# Altium schematic symbol library Tester_componete_PCB.SchLib: 34 symbols
Pins are listed as number, name and electrical type; pins without a type are passive.

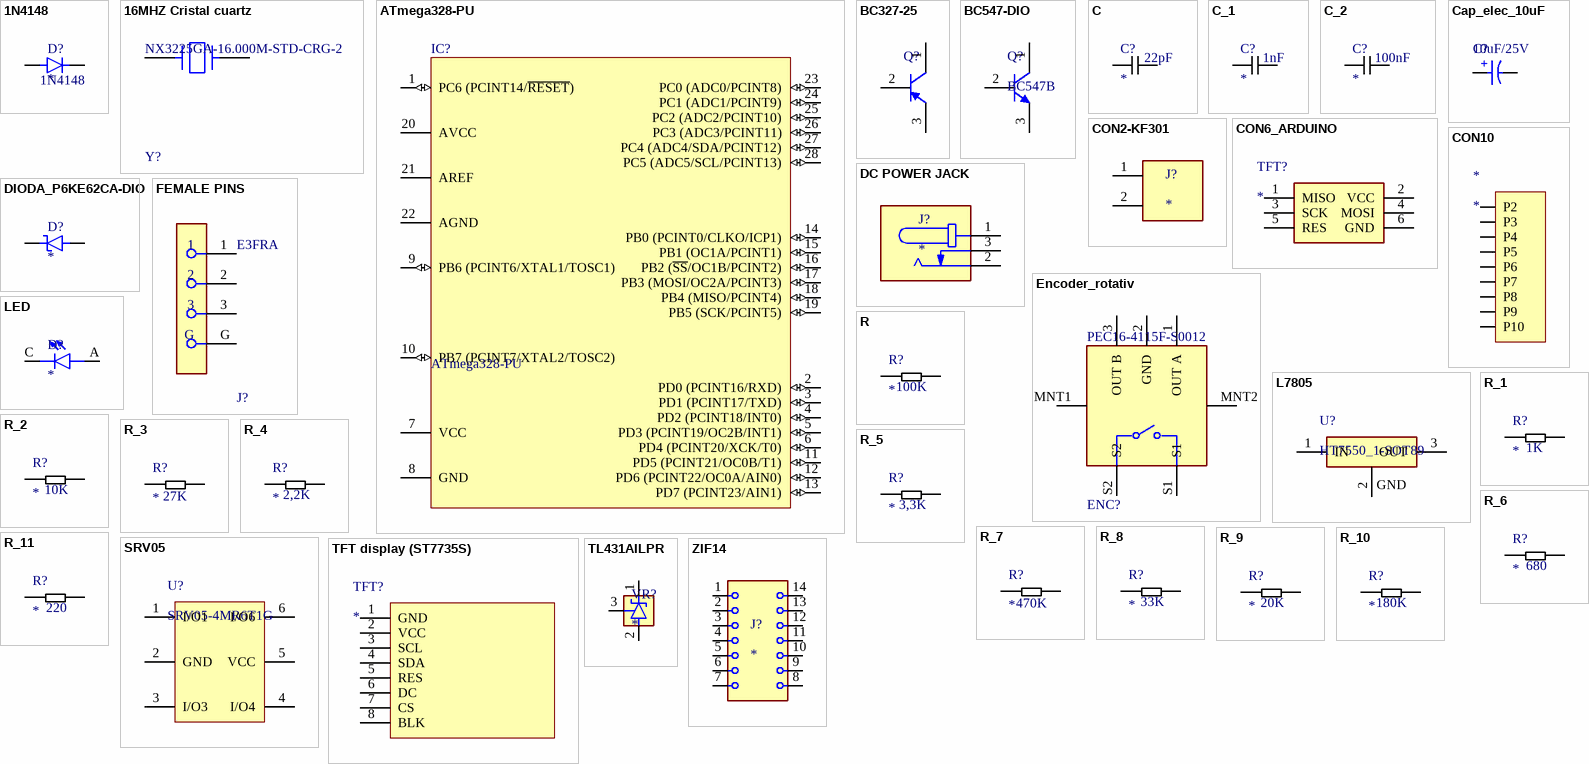
[diagram p0: symbols 1N4148 to ZIF14]

## 1N4148
designator D?  value 1N4148
Diode Standard 100 V 200mA Through Hole DO-35; MF: ON Semiconductor; MP: 1N4148TA; SnapEDA_Link: https://www.snapeda.com/parts/1N4148TA/Onsemi/view-part/?ref=snap; Package: AXIAL LEAD-2 ON Semiconductor; Check_prices: https://www.snapeda.com/parts/1N4148TA/Onsemi/view-part/?ref=eda
footprint FP_1N4148_DO35
pins: A, K

## 16MHZ Cristal cuartz
designator Y?, comment NX3225GA-16.000M-STD-CRG-2
CRYSTAL 16.0000MHZ 8PF SMD; Frequency Stability: 30ppm; Frequency Tolerance: 20ppm; Frequency: 16MHz; ESR (Equivalent Series Resistance): 80R; Min Operating Temperature: -40°C; Mount: Surface Mount; Width: 0.098inch; Case/Package: SMD/SMT; Max Operating Temperature: 85°C; Number of Pins: 4; Length: 0.126inch; Load Capacitance: 8pF; Packaging: Tape and Reel; Package Quantity: 3000; Height: 0.035inch
footprint Cristal_16.00MHz (Cristal;16MHz;THT;20pF;±30ppm;±5ppm/an;1mW;4,88mm / Producator: YIC; Simbol producator: 16.00M-HC49-S; Conformitate / RoHS)
pins: 1, 2

## ATmega328-PU
designator IC?
8-bit AVR Microcontroller, 32KB Flash, 1KB EEPROM, 2KB SRAM, 28-pin PDIP, Industrial Grade (-40°C to 85°C); ComponentLink3Description: ATmega48A/48PA/88A/88PA/168A/168PA/328/328P Summary; RevisionNote: DatasheetVersion updated. URLs added.; DatasheetVersion: revD, May-2011; ComponentLink1URL: http://www.atmel.com/; PackageVersion: revB, Sep-2001; PackageDescription: 28-lead (0.300"/7.62mm Wide) Plastic Dual Inline Package (PDIP); PackageReference: 28P3; ComponentLink1Description: Manufacturer URL; ComponentLink2Description: ATmega48A/48PA/88A/88PA/168A/168PA/328/328P Datasheet; ComponentLink3URL: http://www.atmel.com/dyn/resources/prod_documents/8271S.pdf; ComponentLink2URL: http://www.atmel.com/dyn/resources/prod_documents/8271.pdf
footprint FP_ATMEGA328_DIP28P3 (28-Pin Plastic Dual In-Line Package (PDIP))
pins: 1 PC6 (PCINT14/~{RESET}) (io), 2 PD0 (PCINT16/RXD) (io), 3 PD1 (PCINT17/TXD) (io), 4 PD2 (PCINT18/INT0) (io), 5 PD3 (PCINT19/OC2B/INT1) (io), 6 PD4 (PCINT20/XCK/T0) (io), 7 VCC (power), 8 GND (power), 9 PB6 (PCINT6/XTAL1/TOSC1) (io), 10 PB7 (PCINT7/XTAL2/TOSC2) (io), 11 PD5 (PCINT21/OC0B/T1) (io), 12 PD6 (PCINT22/OC0A/AIN0) (io), 13 PD7 (PCINT23/AIN1) (io), 14 PB0 (PCINT0/CLKO/ICP1) (io), 15 PB1 (OC1A/PCINT1) (io), 16 PB2 (~{SS}/OC1B/PCINT2) (io), 17 PB3 (MOSI/OC2A/PCINT3) (io), 18 PB4 (MISO/PCINT4) (io), 19 PB5 (SCK/PCINT5) (io), 20 AVCC (power), 21 AREF (power), 22 AGND (power), 23 PC0 (ADC0/PCINT8) (io), 24 PC1 (ADC1/PCINT9) (io), 25 PC2 (ADC2/PCINT10) (io), 26 PC3 (ADC3/PCINT11) (io), 27 PC4 (ADC4/SDA/PCINT12) (io), 28 PC5 (ADC5/SCL/PCINT13) (io)

## BC327-25
designator Q?
Tranzistor:PNP;bipolar;45V;0,8A;625mW;TO92 / Producator: DIOTEC SEMICONDUCTOR; Simbol producator: / BC327-25; Conformitate RoHS; Manufacturer: TT Electronics; DC Current Gain (hFE) (Min) @ Ic, Vce: 75@1mA,10V; Vce Saturation (Max) @ Ib, Ic: 1V@50mA,500mA; Current - Collector Cutoff (Max): 50nA; Transistor Type: NPN; Current - Collector (Ic) (Max): 800mA; PCN Design/Specification: TransistorDieChange20/Jun/2014; Voltage - Collector Emitter Breakdown (Max): 50V; Power - Max: 500mW; Online Catalog: NPNTransistors; Other Names: 2N2222AUA-ND365-1563; Mounting Type: SurfaceMount; Package Description: 4-Pin Leadless Chip Carrier, Body 5.59 x 3.81 mm, Pitch 1.27 mm; Manufacturer URL: http://www.ttelectronics.com/; Datasheet Version: 08/2012; Package / Case: 4-CLCC; Package Reference: MO-041BA; Series: -; Category: DiscreteSemiconductorProducts; Supplier Device Package: CeramicSMD; Packaging: Bulk; Mounting Technology: SurfaceMount; Family: Transistors(BJT)-Single; Datasheet URL: http://www.ttelectronics.com/themes/ttelectronics/datasheets/semiconductors/transistors/2N2222AUA.pdf; Frequency - Transition: -; Standard Package: 1
footprint FP_BC327-25_TO-92_CBE
pins: 1 C, 2 B, 3 E

## BC547-DIO
designator Q?, comment BC547B
Tranzistor:NPN;bipolar;45V;0,1A;500mW;TO92 / Producator: DIOTEC SEMICONDUCTOR; Simbol producator: / BC547B; Conformitate RoHS; Manufacturer: TT Electronics; DC Current Gain (hFE) (Min) @ Ic, Vce: 75@1mA,10V; Vce Saturation (Max) @ Ib, Ic: 1V@50mA,500mA; Current - Collector Cutoff (Max): 50nA; Transistor Type: NPN; Current - Collector (Ic) (Max): 800mA; PCN Design/Specification: TransistorDieChange20/Jun/2014; Voltage - Collector Emitter Breakdown (Max): 50V; Online Catalog: NPNTransistors; Other Names: 2N2222AUA-ND365-1563; Mounting Type: SurfaceMount; Package Description: 4-Pin Leadless Chip Carrier, Body 5.59 x 3.81 mm, Pitch 1.27 mm; Manufacturer URL: http://www.ttelectronics.com/; Datasheet Version: 08/2012; Package / Case: 4-CLCC; Package Reference: MO-041BA; Series: -; Category: DiscreteSemiconductorProducts; Supplier Device Package: CeramicSMD; Packaging: Bulk; Mounting Technology: SurfaceMount; Family: Transistors(BJT)-Single; Datasheet URL: http://www.ttelectronics.com/themes/ttelectronics/datasheets/semiconductors/transistors/2N2222AUA.pdf; Frequency - Transition: -; Standard Package: 1; Power - Max: 500mW
footprint FP_BC547_TO-92_CBE
pins: 1 C, 2 B, 3 E

## C
designator C?  value 22pF
Condensator:ceramic;22pF;1kV;C0G (NP0);±5%;THT;5mm / Producator: SR PASSIVES; Simbol producator: / CC2220JNPO1KVB5LS-LF; MF: TDK; MP: FG26C0G2J182JNT06; SnapEDA_Link: https://www.snapeda.com/parts/FG26C0G2J182JNT06/TDK/view-part/?ref=snap; Package: Radial TDK; Check_prices: https://www.snapeda.com/parts/FG26C0G2J182JNT06/TDK/view-part/?ref=eda
footprint FP_CAP
pins: 1, 2

## C_1
designator C?  value 1nF
Condensator:ceramic;1nF;1kV;Y5P;±10%;THT;5mm / Producator: SR PASSIVES; Simbol producator: CCH-1N/1000V; / Conformitate RoHS; MF: TDK; MP: FG26C0G2J182JNT06; SnapEDA_Link: https://www.snapeda.com/parts/FG26C0G2J182JNT06/TDK/view-part/?ref=snap; Package: Radial TDK; Check_prices: https://www.snapeda.com/parts/FG26C0G2J182JNT06/TDK/view-part/?ref=eda
footprint FP_CAP
pins: 1, 2

## C_2
designator C?  value 100nF
Condensator:ceramic;100nF;50V;X7R;±10%;THT;2,5mm / Producator: VISHAY; Simbol producator: K104K10X7RF5UL2; / Conformitate RoHS; MF: TDK; MP: FG26C0G2J182JNT06; SnapEDA_Link: https://www.snapeda.com/parts/FG26C0G2J182JNT06/TDK/view-part/?ref=snap; Package: Radial TDK; Check_prices: https://www.snapeda.com/parts/FG26C0G2J182JNT06/TDK/view-part/?ref=eda
footprint FP_CAP
pins: 1, 2

## Cap_elec_10uF
designator C?, comment 10uF/25V
Aluminum Electrolytic Capacitors 10uF; NexarPartId: 53914228; Voltage Rating: 50V; Ripple Current: 13mA; Pitch: 2mm; Tolerance: 20%; Leakage Current: 3µA; Polarity: Polar; Capacitance: 1µF; ESR (Equivalent Series Resistance): 39.553Ω; Hole Diameter: 800µm; Life (Hours): 2000hours; Lead Pitch: 2.0066mm; Max Operating Temperature: 105°C; Packaging: Tape & Box (TB); Height - Seated (Max): 12.4968mm; Min Operating Temperature: -40°C; Height: 11mm; Length: 11mm; Diameter: 5mm; Case/Package: Radial; Voltage Rating (DC): 50V; RoHS: Compliant; REACH SVHC: Unknown; Mount: Through Hole
footprint FP_CAP_ELEC_10uF
pins: 1 P, 2 N
text: +

## CON2-KF301
designator J?
2 Pin Terminal Block 5mm Pitch; MF: Handson Technology; MP: KF301-2P; SnapEDA_Link: https://www.snapeda.com/parts/KF301-2P/Handson+Technology/view-part/?ref=snap; Package: None; Value: *; Check_prices: https://www.snapeda.com/parts/KF301-2P/Handson+Technology/view-part/?ref=eda
footprint FP_CON-2P
pins: 1, 2

## CON6_ARDUINO
designator TFT?
Display Color 1.8 inch, TFT LCD
footprint FP_CON2X3PINI_2,54
pins: 1 MISO, 2 VCC, 3 SCK, 4 MOSI, 5 RES, 6 GND

## CON10
designator *
pins: 2 P2, 3 P3, 4 P4, 5 P5, 6 P6, 7 P7, 8 P8, 9 P9, 10 P10

## DC POWER JACK
designator J?
Power Barrel Connector Jack 1.30mm ID (0.051), 3.50mm OD (0.138) Through Hole, Right Angle; MF: Same Sky; MP: PJ035D; SnapEDA_Link: https://www.snapeda.com/parts/PJ035D/Same+Sky/view-part/?ref=snap; Package: None; Value: *; Check_prices: https://www.snapeda.com/parts/PJ035D/Same+Sky/view-part/?ref=eda
footprint FP_DC_JACK
pins: 1, 2, 3

## DIODA_P6KE62CA-DIO
designator D?
Dioda:TVS;62V;bidirectionala;±5%;DO15;Ammo Pack;600W;P6KE / Producator: DIOTEC SEMICONDUCTOR; Simbol producator: / P6KE62CA; Conformitate RoHS; MF: Taiwan Semiconductor; MP: P6KE62CAH; SnapEDA_Link: https://www.snapeda.com/parts/P6KE62CAH/taiwan/view-part/?ref=snap; Package: DO-15 Taiwan Semiconductor; Value: *; Check_prices: https://www.snapeda.com/parts/P6KE62CAH/taiwan/view-part/?ref=eda
footprint FP_P6KE62CA-DIO_DO15
pins: A, C

## Encoder_rotativ
designator ENC?, comment PEC16-4115F-S0012
Encoder rotativ cu click 20mm EC11; Pulses per Revolution: 12; Built in Switch: Yes; Output Type: Quadrature; Encoder Type: Mechanical; Number of Channels: 2; Operating Supply Voltage: 5V; Min Operating Temperature: -30°C; Package Quantity: 50; Length: 23mm; Height: 17.3mm; Mount: Through Hole; Termination: PC Pin; Max Operating Temperature: 70°C; Orientation: Vertical; RoHS Compliant: Yes; Series: PEC16; Width: 16mm; Detent: Yes
footprint FP-ENCODER
pins: 1 OUT A, 2 GND, 3 OUT B, MNT1 MNT 1, MNT2 MNT 2, S1, S2

## FEMALE PINS
designator J?, comment E3FRA
E3FRA Q-G Audio Panel Conn -E Series 3 Sckt RA XLR Fem PC Contacts Nickel w/ Silver Pins; NexarPartId: 759683; Max Current Rating: 15A; Number of Positions: 3; Number of Ports: 1; Connector Type: Plug; Voltage Rating: 125V; Gender: Female; Fastening Type: Latch; Length: 26mm; Plating: Nickel; Contact Plating: Silver; Housing Material: Thermoplastic; Mount: Brackets, Panel, Through Hole; Orientation: Right Angle; Insulation Material: Plastic; Packaging: Bulk; Number of Contacts: 3; Termination: Solder; Min Operating Temperature: -55°C; Number of Terminals: 4; Contact Material: Silver; Features: Shielded; Max Operating Temperature: 85°C; Color: Black; Height: 28mm; RoHS: Compliant; Current Rating: 15A; Lead Free: Lead Free
pins: 1, 2, 3, G

## L7805
designator U?, comment HT7550_1-SOT89
Linear Voltage Regulator IC Positive Fixed 1 Output 1.5A TO-220; Code_IPC: SOT89; PackageDescription: 3-Pin SOT-89 Package 1.5 mm Pitch, 4.1 mm Lead Span; PackageVersion: May-2010; DatasheetVersion: Rev1.80, Mar-2010; PackageReference: SOT89
footprint FP_L7805_TO220
pins: 1 IN (power), 2 GND (power), 3 OUT (power)

## LED
designator D?
Green 568nm LED Indication - Discrete 2.2V Radial; MF: Kingbright; MP: WP7113SGD; SnapEDA_Link: https://www.snapeda.com/parts/WP7113SGD/Kingbright/view-part/?ref=snap; Package: Radial Kingbright; Value: *; Check_prices: https://www.snapeda.com/parts/WP7113SGD/Kingbright/view-part/?ref=eda
footprint FP_LED
pins: A, C

## R
designator R?  value 100K
100K REZISTOR, 1%, 0.6W
footprint FP_REZ
pins: 1, 2

## R_1
designator R?  value 1K
1K REZISTOR, 1%, 0.6W
footprint FP_REZ
pins: 1, 2

## R_2
designator R?  value 10K
10K REZISTOR, 1%, 0.6W
footprint FP_REZ
pins: 1, 2

## R_3
designator R?  value 27K
27K REZISTOR, 1%, 0.6W
footprint FP_REZ
pins: 1, 2

## R_4
designator R?  value 2,2K
2K2K REZISTOR, 1%, 0.6W
footprint FP_REZ
pins: 1, 2

## R_5
designator R?  value 3,3K
3K3K REZISTOR, 1%, 0.6W
footprint FP_REZ
pins: 1, 2

## R_6
designator R?  value 680
680Ohm REZISTOR, 1%, 0.6W
footprint FP_REZ
pins: 1, 2

## R_7
designator R?  value 470K
470K REZISTOR, 1%, 0.6W
footprint FP_REZ
pins: 1, 2

## R_8
designator R?  value 33K
33K REZISTOR, 1%, 0.6W
footprint FP_REZ
pins: 1, 2

## R_9
designator R?  value 20K
20K REZISTOR, 1%, 0.6W
footprint FP_REZ
pins: 1, 2

## R_10
designator R?  value 180K
180K REZISTOR, 1%, 0.6W
footprint FP_REZ
pins: 1, 2

## R_11
designator R?  value 220
220Ohm REZISTOR, 1%, 0.6W
footprint FP_REZ
pins: 1, 2

## SRV05
designator U?, comment SRV05-4MR6T1G
Transient Voltage Suppressor, ESD Protection Diodes with Low Clamping Voltage, 6-Pin TSOP, Pb-Free, Tape and Reel; Manufacturer: On Semiconductor; IR Max (uA): 5; Direction: Unidirectional; PPK Max (W): 300; DatasheetVersion: Rev. 1; ComponentLink2Description: Datasheet; ComponentLink3Description: Package Specification; ComponentLink1Description: Manufacturer URL; PartNumber: SRV05-4MR6T1G; PackageReference: TSOP-6-318G-02; PackageDescription: 6-Pin Small Outline Package, Body 3 x 1.5 mm, Pitch 0.95 mm; ComponentLink1URL: http://www.onsemi.com/; ComponentLink2URL: http://www.onsemi.com/pub_link/Collateral/SRV05-4-D.PDF; Packing: Tape and Reel; Mounting Technology: Surface Mount; ComponentLink3URL: http://www.onsemi.com/pub_link/Collateral/318G-02.PDF; PackageVersion: Rev. V, 06/2012; RoHS: Pb-Free
footprint FP_SRV05_SOT23-6
pins: 1 I/O1, 2 GND (power), 3 I/O3, 4 I/O4, 5 VCC (power), 6 I/O6

## TFT display (ST7735S)
designator TFT?
Display Color 1.8 inch, TFT LCD
footprint FP_CON_8PINI_DISPLAY
pins: 1 GND, 2 VCC, 3 SCL, 4 SDA, 5 RES, 6 DC, 7 CS, 8 BLK

## TL431AILPR
designator VR?
IC:Sursa tensiune de referinta;2,495V;±1%;TO92;rola;100mA / Producator: TEXAS INSTRUMENTS; Simbol producator: / TL431AILPR; Conformitate RoHS; MF: {'manufacturer': u'Texas Instruments'}; Package: None; Price: None; Value: *; MP: TL431AILPR; Availability: Unavailable
footprint FP_VREG_TL431AILPR
pins: 1 CATHODE, 2 ANODE, 3 REF

## ZIF14
designator J?
Socket: DIP; ZIF; PIN: 14; 7.62mm; demountable; -40Ã·105Â°C; THT; 50VDC; MP: DS1044-140G; MF: Connfly; Package: None; Availability: Unavailable; Value: *; SnapEDA_Link: https://www.snapeda.com/parts/DS1044-140G/Connfly/view-part/524362/?ref=snap; Price: None
footprint FP_CONNZIF14
pins: 1, 2, 3, 4, 5, 6, 7, 8, 9, 10, 11, 12, 13, 14